# Altium integrated library Ferrite Bead 0805.IntLib: 1 symbol
Pins are listed as number, name and electrical type; pins without a type are passive.

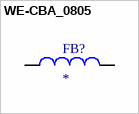
[diagram p0: symbol WE-CBA_0805]

## WE-CBA_0805
designator FB?
FERRITE BEAD 560 OHM 0805 1LN; MF: WÃ¼rth Elektronik; MP: 782853561; SnapEDA_Link: https://www.snapeda.com/parts/782853561/W%25C3%25BCrth+Elektronik+Midcom/view-part/?ref=snap; Package: 0805 Wurth Elektronik; Value: *; Check_prices: https://www.snapeda.com/parts/782853561/W%25C3%25BCrth+Elektronik+Midcom/view-part/?ref=eda
footprint WE-CBA_0805_W4.0
pins: 1, 2